# Altium integrated library Altium_Other.IntLib: 10 symbols
Pins are listed as number, name and electrical type; pins without a type are passive.

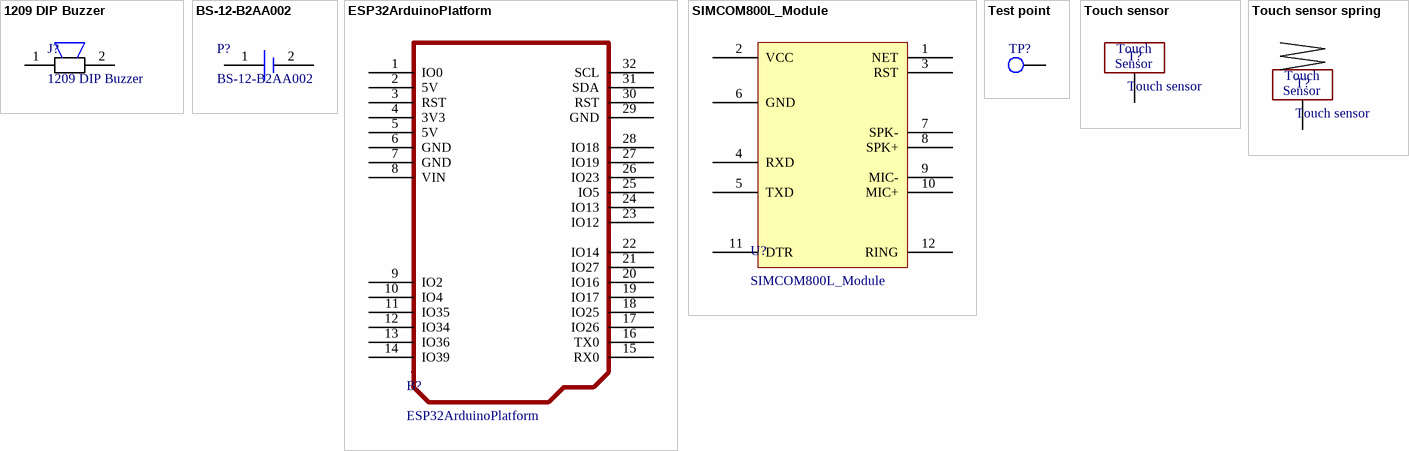
[diagram p0: symbols 1209 DIP Buzzer to Touch sensor spring]

## 1209 DIP Buzzer
designator J?
1209 DIP Buzzer 12x9mm 93dB; Manufacturer: OEM; ComponentLink1Description: Datasheet; ComponentLink1URL: N/A; LCSC Part #: N/A; Manufacturer Part Number: N/A; Mount: THT; Operating Temperature Max: + 70 C; Operating Temperature Min: - 20 C; Package / Case: 1209; Packaging: Tape and Reel; Supplier 1: Mouser; Supplier 1 Part Number: N/A; Supplier 1 URL: N/A; Supplier 2: Digi-Key; Supplier 2 Part Number: N/A; Supplier 2 URL: N/A; Supplier 3: thegioiic; Supplier 3 Part Number: 1209 DIP Buzzer; Supplier 3 URL: https://www.thegioiic.com/1209-dip-buzzer-12x9mm-93db; Value: 1209 DIP Buzzer
footprint 1209_DIP_BUZZER
pins: 1, 2

## BS-12-B2AA002
designator P?
Battery base -25℃~+85℃ SMD Battery Connectors ROHS; Manufacturer: MYOUNG; Value: CR1220; ComponentLink1Description: Datasheet; ComponentLink1URL: https://datasheet.lcsc.com/lcsc/2012311834_MYOUNG-BS-12-B2AA002_C964721.pdf; LCSC Part #: C964721; Manufacturer Part Number: BS-12-B2AA002; Mount: SMD/SMT; Operating Temperature Max: + 85 C; Operating Temperature Min: - 40 C; Package / Case: CR1220;CR1220D;ML1220; Packaging: Tape and Reel; Supplier 1: Mouser; Supplier 1 Part Number: N/A; Supplier 1 URL: N/A; Supplier 2: Digi-Key; Supplier 2 Part Number: N/A; Supplier 2 URL: N/A; Supplier 3: thegioiic; Supplier 3 Part Number: N/A; Supplier 3 URL: N/A
footprint BS-12-B2AA002
pins: 1, 2

## ESP32ArduinoPlatform
designator B?  (no BOM)
footprint ESP32ARDUINOPLATFORM (ESP32ArduinoPlatform)
pins: 1 IO0, 2 5V, 3 RST, 4 3V3, 5 5V, 6 GND, 7 GND, 8 VIN, 9 IO2, 10 IO4, 11 IO35, 12 IO34, 13 IO36, 14 IO39, 15 RX0, 16 TX0, 17 IO26, 18 IO25, 19 IO17, 20 IO16, 21 IO27, 22 IO14, 23 IO12, 24 IO13, 25 IO5, 26 IO23, 27 IO19, 28 IO18, 29 GND, 30 RST, 31 SDA, 32 SCL

## SIMCOM800L_Module
designator U?
Manufacturer: OEM; ComponentLink1Description: Datasheet; ComponentLink1URL: N/A; LCSC Part #: N/A; Manufacturer Part Number: N/A; Mount: N/A; Operating Temperature Max: N/A; Operating Temperature Min: N/A; Package / Case: N/A; Packaging: N/A; Supplier 1: Mouser; Supplier 1 Part Number: N/A; Supplier 1 URL: N/A; Supplier 2: Digi-Key; Supplier 2 Part Number: N/A; Supplier 2 URL: N/A; Supplier 3: thegioiic; Supplier 3 Part Number: N/A; Supplier 3 URL: N/A; Value: N/A
footprint SIMCOM800L
pins: 1 NET, 2 VCC, 3 RST, 4 RXD, 5 TXD, 6 GND, 7 SPK-, 8 SPK+, 9 MIC-, 10 MIC+, 11 DTR, 12 RING

## Test point
designator TP?  (value not drawn)  (no BOM)
Manufacturer: OEM; ComponentLink1Description: Datasheet; ComponentLink1URL: N/A; LCSC Part #: N/A; Manufacturer Part Number: N/A; Mount: N/A; Operating Temperature Max: N/A; Operating Temperature Min: N/A; Package / Case: N/A; Packaging: N/A; Supplier 1: Mouser; Supplier 1 Part Number: N/A; Supplier 1 URL: N/A; Supplier 2: Digi-Key; Supplier 2 Part Number: N/A; Supplier 2 URL: N/A; Supplier 3: thegioiic; Supplier 3 Part Number: N/A; Supplier 3 URL: N/A; Value: N/A
footprint TP
pins: 1 27

## Touch sensor
designator T?  (no BOM)
Touch sensor PCB; Manufacturer: OEM; ComponentLink1Description: Datasheet; ComponentLink1URL: N/A; LCSC Part #: N/A; Manufacturer Part Number: N/A; Mount: N/A; Operating Temperature Max: N/A; Operating Temperature Min: N/A; Package / Case: N/A; Packaging: N/A; Supplier 1: Mouser; Supplier 1 Part Number: N/A; Supplier 1 URL: N/A; Supplier 2: Digi-Key; Supplier 2 Part Number: N/A; Supplier 2 URL: N/A; Supplier 3: thegioiic; Supplier 3 Part Number: N/A; Supplier 3 URL: N/A; Value: N/A
footprint TOUCHSENSOR_PCB
pins: 1 27
text: Touch; Sensor

## Touch sensor spring
designator T?, comment Touch sensor  (no BOM)
9x12mm LX-0912; Manufacturer: OEM; ComponentLink1Description: Datasheet; ComponentLink1URL: N/A; LCSC Part #: N/A; Manufacturer Part Number: N/A; Mount: N/A; Operating Temperature Max: N/A; Operating Temperature Min: N/A; Package / Case: N/A; Packaging: N/A; Supplier 1: Mouser; Supplier 1 Part Number: N/A; Supplier 1 URL: N/A; Supplier 2: Digi-Key; Supplier 2 Part Number: N/A; Supplier 2 URL: N/A; Supplier 3: thegioiic; Supplier 3 Part Number: N/A; Supplier 3 URL: N/A; Value: N/A
footprint TOUCHSENSOR_SPRING
pins: 1 27
text: Touch; Sensor


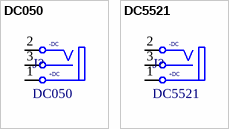
[diagram p1: symbols DC050 to DC5521]

## DC050
designator J?
Manufacturer: OEM; Rated Current: 2.5A; Working Voltage: 16V; ComponentLink1Description: Datasheet link; ComponentLink1URL: N/A; ComponentLink2Description: Supplier 1 URL; ComponentLink2URL: N/A; ComponentLink3Description: Supplier 2 URL; ComponentLink3URL: N/A; ComponentLink4Description: Supplier 3 URL; ComponentLink4URL: https://www.thegioiic.com/dc050-dau-noi-nguon-dc-cai-5521-dan-smd-kim-2-1mm; Manufacturer Part Number: N/A; Mount: SMD; Number of Pins: 4; Operating Temperature Max: N/A; Operating Temperature Min: N/A; Orientation: N/A; Packaging: N/A; Supplier 1 Name: Mouser; Supplier 1 SN: N/A; Supplier 1 URL: N/A; Supplier 2 Name: Digi-Key; Supplier 2 SN: N/A; Supplier 2 URL: N/A; Supplier 3 Name: thegioiic; Supplier 3 SN: DC050; Supplier 3 URL: https://www.thegioiic.com/dc050-dau-noi-nguon-dc-cai-5521-dan-smd-kim-2-1mm; Value: DC050
footprint DC050
pins: 1 T "Tip", 2 TN "Tip Normal (Break Contact)", 3 S (power) "Sleeve (Ground)"
text: -DC; +DC

## DC5521
designator J?
Manufacturer: OEM; Rated Current: 2.5A; Working Voltage: 16V; ComponentLink1Description: Datasheet link; ComponentLink1URL: N/A; ComponentLink2Description: Supplier 1 URL; ComponentLink2URL: N/A; ComponentLink3Description: Supplier 2 URL; ComponentLink3URL: N/A; ComponentLink4Description: Supplier 3 URL; ComponentLink4URL: https://www.thegioiic.com/dc050-dau-noi-nguon-dc-cai-5521-dan-smd-kim-2-1mm; Manufacturer Part Number: N/A; Mount: THT; Number of Pins: 3; Operating Temperature Max: N/A; Operating Temperature Min: N/A; Orientation: N/A; Packaging: N/A; Supplier 1 Name: Mouser; Supplier 1 SN: N/A; Supplier 1 URL: N/A; Supplier 2 Name: Digi-Key; Supplier 2 SN: N/A; Supplier 2 URL: N/A; Supplier 3 Name: thegioiic; Supplier 3 SN: DC5521; Supplier 3 URL: https://www.thegioiic.com/dc050-dau-noi-nguon-dc-cai-5521-dan-smd-kim-2-1mm; Value: DC5521
footprint DC5521 (Jac DC input)
pins: 1 T "Tip", 2 TN "Tip Normal (Break Contact)", 3 S (power) "Sleeve (Ground)"
text: -DC; +DC


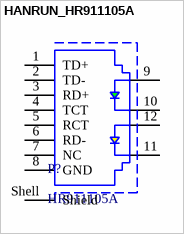
[diagram p2: symbol HANRUN_HR911105A]

## HANRUN_HR911105A
designator P?, comment HR911105A
Single Port RJ45 Connector with Integrated Magnetics and LED; Manufacturer Part Number: N/A; Manufacture SN: N/A; Mounting Technology: THT; Operating Temperature: -55 to +125degC; Packaging: N/A; Supplier 1: Mouser; Supplier 1 Part Number: N/A; Supplier 1 URL: N/A; Supplier 2: Digi-Key; Supplier 2 Part Number: N/A; Supplier 2 URL: N/A; Supplier 3: thegioiic; Supplier 3 Part Number: HR911105A; Supplier 3 URL: https://www.thegioiic.com/hr911105a-cong-rj45-cai-co-led-hanrun; Value: HR911105A; ComponentLink1Description: Datasheet; ComponentLink1URL: https://tme.vn/upload/pdf/HR911105A.pdf
footprint HANRUN_HR911105A
pins: 1 TD+, 2 TD-, 3 RD+, 4 TCT, 5 RCT, 6 RD-, 7 NC, 8 GND, 9, 10, 11, 12, Shell Shield